# Altium footprint library WE-VD.PcbLib: 120 footprints (part 1 of 8)
Each footprint in its own frame and in the unit in brackets; x right, y up, seen from the top. Pads: shape width x height; smd on the part's side, far side on the other; paste and mask are expansions set on the pad; w line width, h text height; cw(c..) or ccw(c..) is an arc to the next point about the centre after c.
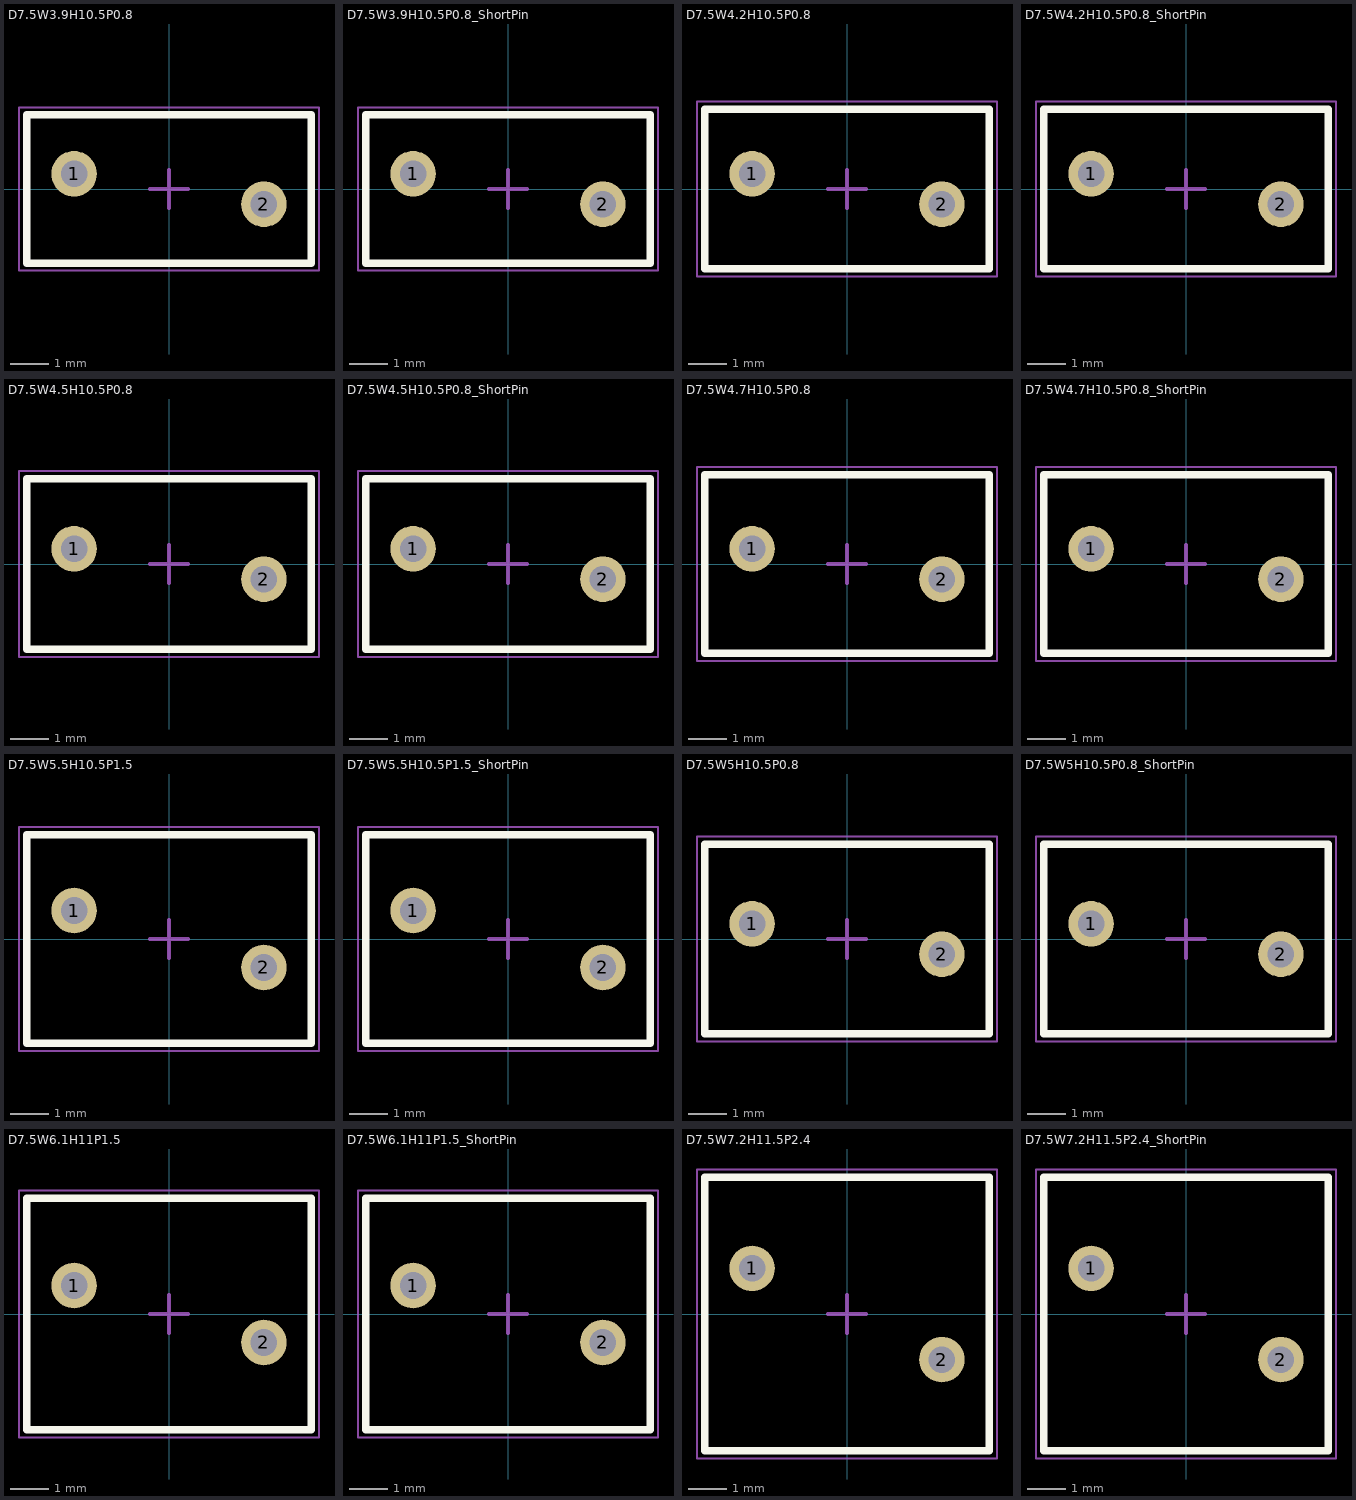
[diagram p0: the footprints below, top view; thin cyan lines are the x and y axes]

## D7.5W3.9H10.5P0.8 [mm] "Disk Varistor, Diameter 7.5mm, Width 3.9mm"
height 10.5
pads (2):
  round 1.2 hole 0.7: 1(-2.5,0.4) 2(2.5,-0.4)
Top Overlay:
  lines w0.2: -3.75,-1.95 3.75,-1.95 3.75,1.95 -3.75,1.95 -3.75,-1.95
Top Assembly:
  lines w0.1: -3.75,-1.95 -3.75,1.95 3.75,1.95 3.75,-1.95 -3.75,-1.95
Top Designator:
  text ".Designator" at -3.647,-0.357 h1
Top 3D Body:
  lines w0.1: -3.75,-1.95 -3.75,1.95 3.75,1.95 3.75,-1.95 -3.75,-1.95
Top Courtyard:
  lines w0.05: -3.95,-2.15 3.95,-2.15 3.95,2.15 -3.95,2.15 -3.95,-2.15
Top Component Center:
  lines w0.1: -0.5,0 0.5,0 ; 0,-0.5 0,0.5
3D body "820556001.stp": height 8.14, standoff -22.85, extent -2.997,-1.45 2.998,1.45

## D7.5W3.9H10.5P0.8_ShortPin [mm] "Disk Varistor, Diameter 7.5mm, Width 3.9mm"
height 10.5
pads (2):
  round 1.2 hole 0.7: 1(-2.5,0.4) 2(2.5,-0.4)
Top Overlay:
  lines w0.2: -3.75,-1.95 -3.75,1.95 3.75,1.95 3.75,-1.95 -3.75,-1.95
Top Assembly:
  lines w0.1: -3.75,-1.95 3.75,-1.95 3.75,1.95 -3.75,1.95 -3.75,-1.95
Top Designator:
  text ".Designator" at -3.647,-0.357 h1
Top 3D Body:
  lines w0.1: -3.75,-1.95 3.75,-1.95 3.75,1.95 -3.75,1.95 -3.75,-1.95
Top Courtyard:
  lines w0.05: -3.95,-2.15 -3.95,2.15 3.95,2.15 3.95,-2.15 -3.95,-2.15
Top Component Center:
  lines w0.1: -0.5,0 0.5,0 ; 0,-0.5 0,0.5
3D body "820556001.stp": height 10.55, standoff -3.05, extent -3.75,-1.95 3.75,1.95

## D7.5W4.2H10.5P0.8 [mm] "Disk Varistor, Diameter 7.5mm, Width 4.2mm"
height 10.5
pads (2):
  round 1.2 hole 0.7: 1(-2.5,0.4) 2(2.5,-0.4)
Top Overlay:
  lines w0.2: -3.75,-2.1 3.75,-2.1 3.75,2.1 -3.75,2.1 -3.75,-2.1
Top Assembly:
  lines w0.1: -3.75,-2.1 -3.75,2.1 3.75,2.1 3.75,-2.1 -3.75,-2.1
Top Designator:
  text ".Designator" at -3.647,-0.357 h1
Top 3D Body:
  lines w0.1: -3.75,-2.1 -3.75,2.1 3.75,2.1 3.75,-2.1 -3.75,-2.1
Top Courtyard:
  lines w0.05: -3.95,-2.3 3.95,-2.3 3.95,2.3 -3.95,2.3 -3.95,-2.3
Top Component Center:
  lines w0.1: -0.5,0 0.5,0 ; 0,-0.5 0,0.5
3D body "820551311.stp": height 8.14, standoff -22.85, extent -2.993,-1.65 2.993,1.65

## D7.5W4.2H10.5P0.8_ShortPin [mm] "Disk Varistor, Diameter 7.5mm, Width 4.2mm"
height 10.5
pads (2):
  round 1.2 hole 0.7: 1(-2.5,0.4) 2(2.5,-0.4)
Top Overlay:
  lines w0.2: -3.75,-2.1 3.75,-2.1 3.75,2.1 -3.75,2.1 -3.75,-2.1
Top Assembly:
  lines w0.1: -3.75,-2.1 -3.75,2.1 3.75,2.1 3.75,-2.1 -3.75,-2.1
Top Designator:
  text ".Designator" at -3.647,-0.357 h1
Top 3D Body:
  lines w0.1: -3.75,-2.1 -3.75,2.1 3.75,2.1 3.75,-2.1 -3.75,-2.1
Top Courtyard:
  lines w0.05: -3.95,-2.3 3.95,-2.3 3.95,2.3 -3.95,2.3 -3.95,-2.3
Top Component Center:
  lines w0.1: -0.5,0 0.5,0 ; 0,-0.5 0,0.5
3D body "820551311.stp": height 10.55, standoff -3.05, extent -3.75,-2.1 3.75,2.1

## D7.5W4.5H10.5P0.8 [mm] "Disk Varistor, Diameter 7.5mm, Width 4.5mm"
height 10.5
pads (2):
  round 1.2 hole 0.7: 1(-2.5,0.4) 2(2.5,-0.4)
Top Overlay:
  lines w0.2: -3.75,-2.25 -3.75,2.25 3.75,2.25 3.75,-2.25 -3.75,-2.25
Top Assembly:
  lines w0.1: -3.75,-2.25 3.75,-2.25 3.75,2.25 -3.75,2.25 -3.75,-2.25
Top Designator:
  text ".Designator" at -3.647,-0.357 h1
Top 3D Body:
  lines w0.1: -3.75,-2.25 3.75,-2.25 3.75,2.25 -3.75,2.25 -3.75,-2.25
Top Courtyard:
  lines w0.05: -3.95,-2.45 -3.95,2.45 3.95,2.45 3.95,-2.45 -3.95,-2.45
Top Component Center:
  lines w0.1: -0.5,0 0.5,0 ; 0,-0.5 0,0.5
3D body "820551406.stp": height 8.13, standoff -22.85, extent -2.994,-1.55 2.994,1.55

## D7.5W4.5H10.5P0.8_ShortPin [mm] "Disk Varistor, Diameter 7.5mm, Width 4.5mm"
height 10.5
pads (2):
  round 1.2 hole 0.7: 1(-2.5,0.4) 2(2.5,-0.4)
Top Overlay:
  lines w0.2: -3.75,-2.25 -3.75,2.25 3.75,2.25 3.75,-2.25 -3.75,-2.25
Top Assembly:
  lines w0.1: -3.75,-2.25 3.75,-2.25 3.75,2.25 -3.75,2.25 -3.75,-2.25
Top Designator:
  text ".Designator" at -3.647,-0.357 h1
Top 3D Body:
  lines w0.1: -3.75,-2.25 3.75,-2.25 3.75,2.25 -3.75,2.25 -3.75,-2.25
Top Courtyard:
  lines w0.05: -3.95,-2.45 -3.95,2.45 3.95,2.45 3.95,-2.45 -3.95,-2.45
Top Component Center:
  lines w0.1: -0.5,0 0.5,0 ; 0,-0.5 0,0.5
3D body "820551406.stp": height 10.55, standoff -3.05, extent -3.75,-2.25 3.75,2.25

## D7.5W4.7H10.5P0.8 [mm] "Disk Varistor, Diameter 7.5mm, Width 4.7mm"
height 10.5
pads (2):
  round 1.2 hole 0.7: 1(-2.5,0.4) 2(2.5,-0.4)
Top Overlay:
  lines w0.2: -3.75,-2.35 3.75,-2.35 3.75,2.35 -3.75,2.35 -3.75,-2.35
Top Assembly:
  lines w0.1: -3.75,-2.35 -3.75,2.35 3.75,2.35 3.75,-2.35 -3.75,-2.35
Top Designator:
  text ".Designator" at -3.647,-0.357 h1
Top 3D Body:
  lines w0.1: -3.75,-2.35 -3.75,2.35 3.75,2.35 3.75,-2.35 -3.75,-2.35
Top Courtyard:
  lines w0.05: -3.95,-2.55 3.95,-2.55 3.95,2.55 -3.95,2.55 -3.95,-2.55
Top Component Center:
  lines w0.1: -0.5,0 0.5,0 ; 0,-0.5 0,0.5
3D body "820452001.stp": height 8.13, standoff -22.85, extent -2.994,-1.55 2.994,1.55

## D7.5W4.7H10.5P0.8_ShortPin [mm] "Disk Varistor, Diameter 7.5mm, Width 4.7mm"
height 10.5
pads (2):
  round 1.2 hole 0.7: 1(-2.5,0.4) 2(2.5,-0.4)
Top Overlay:
  lines w0.2: -3.75,-2.35 3.75,-2.35 3.75,2.35 -3.75,2.35 -3.75,-2.35
Top Assembly:
  lines w0.1: -3.75,-2.35 -3.75,2.35 3.75,2.35 3.75,-2.35 -3.75,-2.35
Top Designator:
  text ".Designator" at -3.647,-0.357 h1
Top 3D Body:
  lines w0.1: -3.75,-2.35 -3.75,2.35 3.75,2.35 3.75,-2.35 -3.75,-2.35
Top Courtyard:
  lines w0.05: -3.95,-2.55 3.95,-2.55 3.95,2.55 -3.95,2.55 -3.95,-2.55
Top Component Center:
  lines w0.1: -0.5,0 0.5,0 ; 0,-0.5 0,0.5
3D body "820452001.stp": height 10.55, standoff -3.05, extent -3.75,-2.35 3.75,2.35

## D7.5W5.5H10.5P1.5 [mm] "Disk Varistor, Diameter 7.5mm, Width 5.5mm"
height 10.5
pads (2):
  round 1.2 hole 0.7: 1(-2.5,0.75) 2(2.5,-0.75)
Top Overlay:
  lines w0.2: -3.75,-2.75 3.75,-2.75 3.75,2.75 -3.75,2.75 -3.75,-2.75
Top Assembly:
  lines w0.1: -3.75,-2.75 -3.75,2.75 3.75,2.75 3.75,-2.75 -3.75,-2.75
Top Designator:
  text ".Designator" at -3.647,-0.357 h1
Top 3D Body:
  lines w0.1: -3.75,-2.75 -3.75,2.75 3.75,2.75 3.75,-2.75 -3.75,-2.75
Top Courtyard:
  lines w0.05: -3.95,-2.95 3.95,-2.95 3.95,2.95 -3.95,2.95 -3.95,-2.95
Top Component Center:
  lines w0.1: -0.5,0 0.5,0 ; 0,-0.5 0,0.5
3D body "820554001.stp": height 8.15, standoff -22.85, extent -3,-1.85 3,1.85

## D7.5W5.5H10.5P1.5_ShortPin [mm] "Disk Varistor, Diameter 7.5mm, Width 5.5mm"
height 10.5
pads (2):
  round 1.2 hole 0.7: 1(-2.5,0.75) 2(2.5,-0.75)
Top Overlay:
  lines w0.2: -3.75,-2.75 -3.75,2.75 3.75,2.75 3.75,-2.75 -3.75,-2.75
Top Assembly:
  lines w0.1: -3.75,-2.75 3.75,-2.75 3.75,2.75 -3.75,2.75 -3.75,-2.75
Top Designator:
  text ".Designator" at -3.647,-0.357 h1
Top 3D Body:
  lines w0.1: -3.75,-2.75 3.75,-2.75 3.75,2.75 -3.75,2.75 -3.75,-2.75
Top Courtyard:
  lines w0.05: -3.95,-2.95 -3.95,2.95 3.95,2.95 3.95,-2.95 -3.95,-2.95
Top Component Center:
  lines w0.1: -0.5,0 0.5,0 ; 0,-0.5 0,0.5
3D body "820554001.stp": height 10.75, standoff -2.85, extent -3.75,-2.75 3.75,2.75

## D7.5W5H10.5P0.8 [mm] "Disk Varistor, Diameter 7.5mm, Width 5mm"
height 10.5
pads (2):
  round 1.2 hole 0.7: 1(-2.5,0.4) 2(2.5,-0.4)
Top Overlay:
  lines w0.2: -3.75,-2.5 -3.75,2.5 3.75,2.5 3.75,-2.5 -3.75,-2.5
Top Assembly:
  lines w0.1: -3.75,-2.5 3.75,-2.5 3.75,2.5 -3.75,2.5 -3.75,-2.5
Top Designator:
  text ".Designator" at -3.647,-0.357 h1
Top 3D Body:
  lines w0.1: -3.75,-2.5 3.75,-2.5 3.75,2.5 -3.75,2.5 -3.75,-2.5
Top Courtyard:
  lines w0.05: -3.95,-2.7 -3.95,2.7 3.95,2.7 3.95,-2.7 -3.95,-2.7
Top Component Center:
  lines w0.1: -0.5,0 0.5,0 ; 0,-0.5 0,0.5
3D body "820453001.stp": height 8.15, standoff -22.85, extent -3,-1.75 3,1.75

## D7.5W5H10.5P0.8_ShortPin [mm] "Disk Varistor, Diameter 7.5mm, Width 5mm"
height 10.5
pads (2):
  round 1.2 hole 0.7: 1(-2.5,0.4) 2(2.5,-0.4)
Top Overlay:
  lines w0.2: -3.75,-2.5 -3.75,2.5 3.75,2.5 3.75,-2.5 -3.75,-2.5
Top Assembly:
  lines w0.1: -3.75,-2.5 3.75,-2.5 3.75,2.5 -3.75,2.5 -3.75,-2.5
Top Designator:
  text ".Designator" at -3.647,-0.357 h1
Top 3D Body:
  lines w0.1: -3.75,-2.5 3.75,-2.5 3.75,2.5 -3.75,2.5 -3.75,-2.5
Top Courtyard:
  lines w0.05: -3.95,-2.7 -3.95,2.7 3.95,2.7 3.95,-2.7 -3.95,-2.7
Top Component Center:
  lines w0.1: -0.5,0 0.5,0 ; 0,-0.5 0,0.5
3D body "820453001.stp": height 10.75, standoff -2.85, extent -3.75,-2.5 3.75,2.5

## D7.5W6.1H11P1.5 [mm] "Disk Varistor, Diameter 7.5mm, Width 6.1mm"
height 11
pads (2):
  round 1.2 hole 0.7: 1(-2.5,0.75) 2(2.5,-0.75)
Top Overlay:
  lines w0.2: -3.75,-3.05 3.75,-3.05 3.75,3.05 -3.75,3.05 -3.75,-3.05
Top Assembly:
  lines w0.1: -3.75,-3.05 -3.75,3.05 3.75,3.05 3.75,-3.05 -3.75,-3.05
Top Designator:
  text ".Designator" at -3.647,-0.357 h1
Top 3D Body:
  lines w0.1: -3.75,-3.05 -3.75,3.05 3.75,3.05 3.75,-3.05 -3.75,-3.05
Top Courtyard:
  lines w0.05: -3.95,-3.25 3.95,-3.25 3.95,3.25 -3.95,3.25 -3.95,-3.25
Top Component Center:
  lines w0.1: -0.5,0 0.5,0 ; 0,-0.5 0,0.5
3D body "820552711.stp": height 8.15, standoff -22.85, extent -3,-1.9 3,1.9

## D7.5W6.1H11P1.5_ShortPin [mm] "Disk Varistor, Diameter 7.5mm, Width 6.1mm"
height 11
pads (2):
  round 1.2 hole 0.7: 1(-2.5,0.75) 2(2.5,-0.75)
Top Overlay:
  lines w0.2: -3.75,-3.05 -3.75,3.05 3.75,3.05 3.75,-3.05 -3.75,-3.05
Top Assembly:
  lines w0.1: -3.75,-3.05 3.75,-3.05 3.75,3.05 -3.75,3.05 -3.75,-3.05
Top Designator:
  text ".Designator" at -3.647,-0.357 h1
Top 3D Body:
  lines w0.1: -3.75,-3.05 3.75,-3.05 3.75,3.05 -3.75,3.05 -3.75,-3.05
Top Courtyard:
  lines w0.05: -3.95,-3.25 -3.95,3.25 3.95,3.25 3.95,-3.25 -3.95,-3.25
Top Component Center:
  lines w0.1: -0.5,0 0.5,0 ; 0,-0.5 0,0.5
3D body "820552711.stp": height 11.05, standoff -3.05, extent -3.75,-3.05 3.75,3.05

## D7.5W7.2H11.5P2.4 [mm] "Disk Varistor, Diameter 7.5mm, Width 7.2mm"
height 11.5
pads (2):
  round 1.2 hole 0.7: 1(-2.5,1.2) 2(2.5,-1.2)
Top Overlay:
  lines w0.2: -3.75,-3.6 3.75,-3.6 3.75,3.6 -3.75,3.6 -3.75,-3.6
Top Assembly:
  lines w0.1: -3.75,-3.6 -3.75,3.6 3.75,3.6 3.75,-3.6 -3.75,-3.6
Top Designator:
  text ".Designator" at -3.647,-0.357 h1
Top 3D Body:
  lines w0.1: -3.75,-3.6 -3.75,3.6 3.75,3.6 3.75,-3.6 -3.75,-3.6
Top Courtyard:
  lines w0.05: -3.95,-3.8 3.95,-3.8 3.95,3.8 -3.95,3.8 -3.95,-3.8
Top Component Center:
  lines w0.1: -0.5,0 0.5,0 ; 0,-0.5 0,0.5
3D body "820453811.stp": height 8.15, standoff -22.85, extent -3,-2.35 3,2.35

## D7.5W7.2H11.5P2.4_ShortPin [mm] "Disk Varistor, Diameter 7.5mm, Width 7.2mm"
height 11.5
pads (2):
  round 1.2 hole 0.7: 1(-2.5,1.2) 2(2.5,-1.2)
Top Overlay:
  lines w0.2: -3.75,-3.6 3.75,-3.6 3.75,3.6 -3.75,3.6 -3.75,-3.6
Top Assembly:
  lines w0.1: -3.75,-3.6 -3.75,3.6 3.75,3.6 3.75,-3.6 -3.75,-3.6
Top Designator:
  text ".Designator" at -3.647,-0.357 h1
Top 3D Body:
  lines w0.1: -3.75,-3.6 -3.75,3.6 3.75,3.6 3.75,-3.6 -3.75,-3.6
Top Courtyard:
  lines w0.05: -3.95,-3.8 3.95,-3.8 3.95,3.8 -3.95,3.8 -3.95,-3.8
Top Component Center:
  lines w0.1: -0.5,0 0.5,0 ; 0,-0.5 0,0.5
3D body "820453811.stp": height 11.55, standoff -3.05, extent -3.75,-3.6 3.75,3.6